# Altium footprint library Footprint-Lib-PhilsLab.PcbLib: 544 footprints (part 24 of 34)
Each footprint in its own frame and in the unit in brackets; x right, y up, seen from the top. Pads: shape width x height; smd on the part's side, far side on the other; paste and mask are expansions set on the pad; w line width, h text height; cw(c..) or ccw(c..) is an arc to the next point about the centre after c.
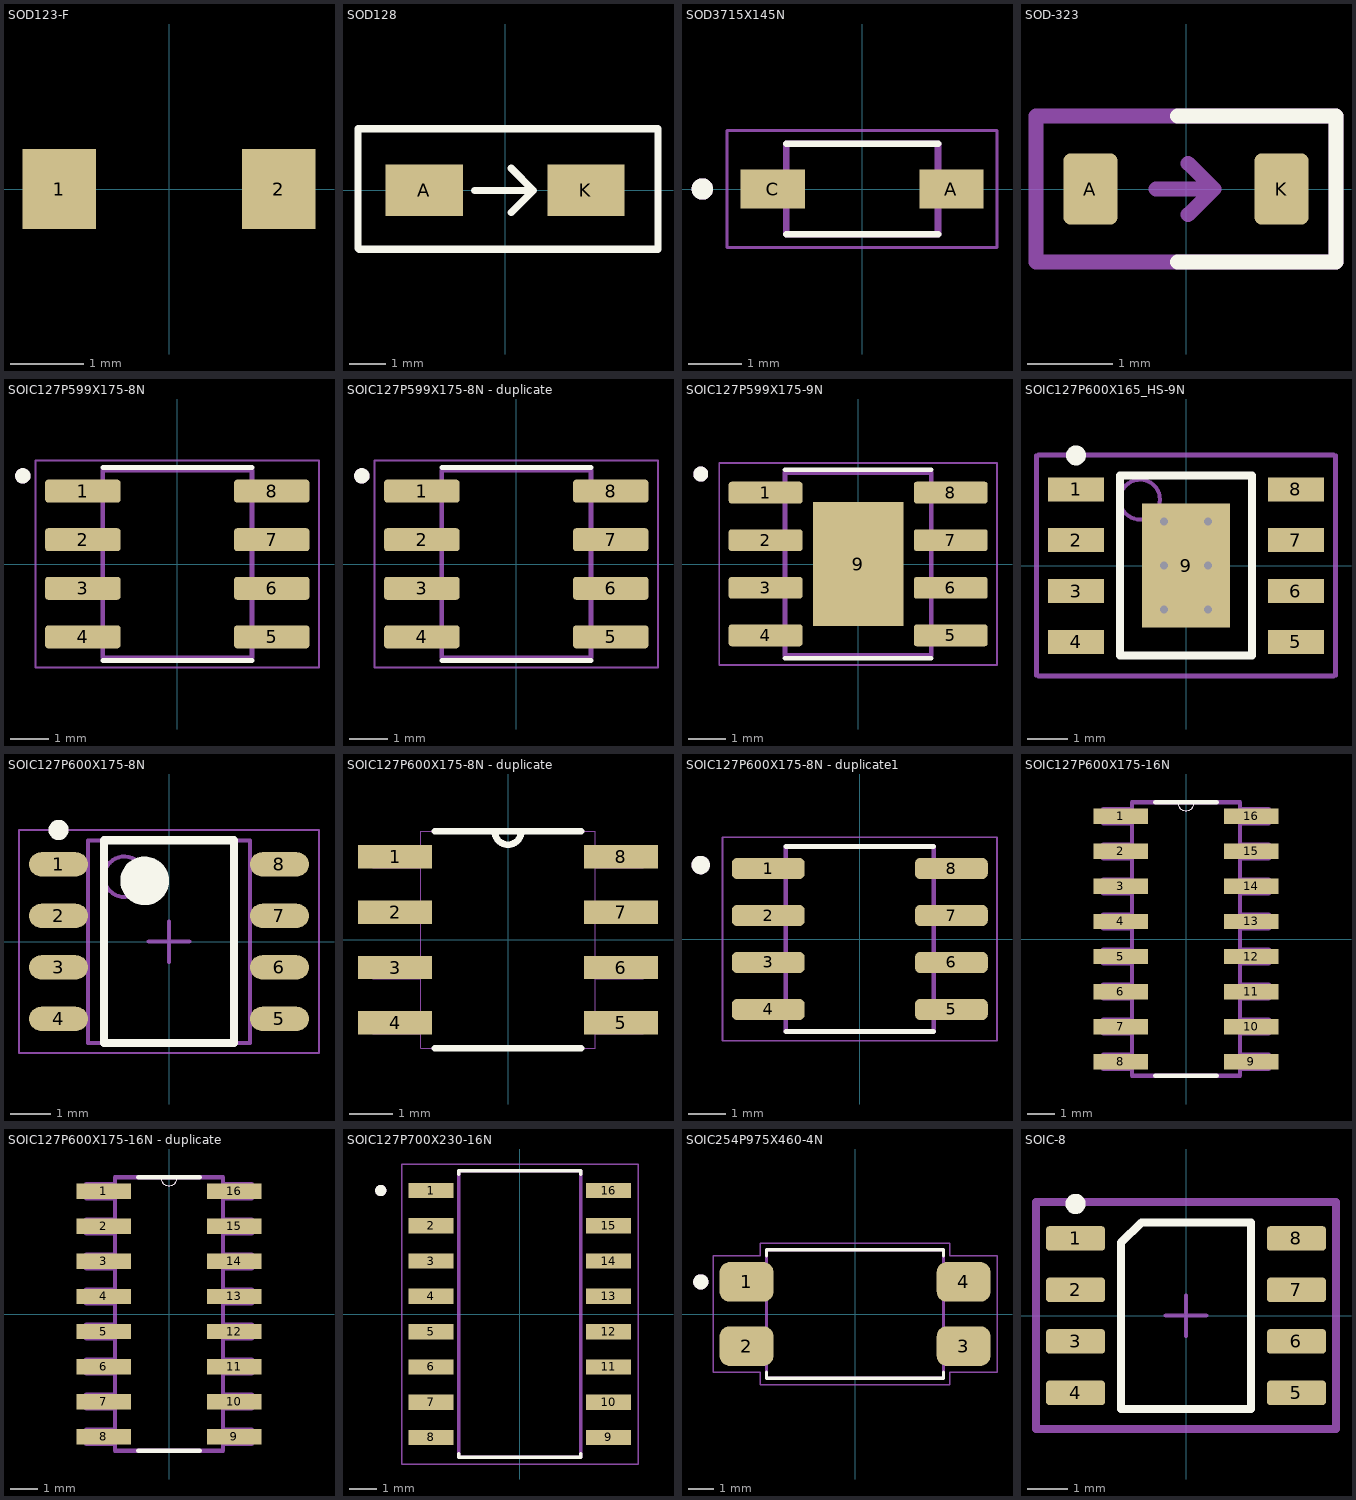
[diagram p23: the footprints below, top view; thin cyan lines are the x and y axes]

## SOD123-F [mm]
pads (2):
  rect 1x1.1 smd: 1(-1.5,0) 2(1.5,0)
3D body "SOD-123F.step": height 1.02, standoff 0, extent -1.9,-0.98 1.9,0.82

## SOD128 [mm]
pads (2):
  rect 2.1x1.4 smd: A(-2.2,0) K(2.2,0)
Top Overlay:
  lines w0.2: -4,1.63 -4,-0.04 -4,-1.58 -3.97,-1.61 4.16,-1.61 4.16,1.67 -3.99,1.67 ; -0.83,-0.01 0.77,-0.01 ; 0.17,-0.61 0.77,-0.01 ; 0.17,0.59 0.77,-0.01
3D body "DO-214AC_SMA.step": height 2.42, standoff 0.01, extent -2.78,-1.2 2.42,1.4

## SOD3715X145N [mm]
pads (2):
  rect 1.21x0.73 smd: A(1.68,0) C(-1.68,0)
Top Overlay:
  circle w0.2: c-3,0 r0.1
  lines w0.127: -1.425,-0.85 1.425,-0.85 ; -1.425,0.85 1.425,0.85
Mechanical 13:
  circle w0.2: c-3,0 r0.1
  lines w0.127: -1.425,-0.85 -1.425,0.85 1.425,0.85 1.425,-0.85 -1.425,-0.85
Mechanical 15:
  lines w0.05: -2.535,-1.1 -2.535,1.1 2.535,1.1 2.535,-1.1 -2.535,-1.1
3D body "step_temp.STEP": height 1.5, standoff -0.03, extent -1.825,-0.775 1.825,0.775

## SOD-323 [mm]
pads (2):
  rrect25% 0.63x0.83 smd: A(-1.115,0) K(1.115,0)
Top Overlay:
  lines w0.175: -0.1,-0.85 1.75,-0.85 1.75,0.85 -0.1,0.85
Mechanical 13:
  lines w0.175: -0.35,0 0.325,0 ; 0.025,-0.3 0.325,0 ; 0.025,0.3 0.325,0 ; -1.75,-0.85 -1.75,0.85 1.75,0.85 1.75,-0.85 -1.75,-0.85
  text "'.Designator'" at -5.677,-0.417 h1
3D body "SOD-323.step": height 1.1, standoff 0, extent -1.3,-0.675 1.3,0.675

## SOIC127P599X175-8N [mm]
pads (8):
  rrect25% 1.97x0.6 smd: 1(-2.47,1.905) 2(-2.47,0.635) 3(-2.47,-0.635) 4(-2.47,-1.905) 5(2.47,-1.905) 6(2.47,-0.635) 7(2.47,0.635) 8(2.47,1.905)
Top Overlay:
  circle w0.2: c-4.04,2.305 r0.1
  lines w0.127: -1.95,-2.525 1.95,-2.525 ; -1.95,2.525 1.95,2.525
Mechanical 13:
  circle w0.2: c-4.04,2.305 r0.1
  lines w0.127: -1.95,-2.452 1.95,-2.452 1.95,2.452 -1.95,2.452 -1.95,-2.452
Mechanical 15:
  lines w0.05: -3.705,-2.702 3.705,-2.702 3.705,2.702 -3.705,2.702 -3.705,-2.702
3D body "step_temp.STEP": height 1.75, standoff 0, extent -2.997,-2.451 2.997,2.451

## SOIC127P599X175-8N - duplicate [mm]
height 1.75
pads (8):
  rrect25% 1.97x0.6 smd paste+0 mask+0.102: 1(-2.47,1.905) 2(-2.47,0.635) 3(-2.47,-0.635) 4(-2.47,-1.905) 5(2.47,-1.905) 6(2.47,-0.635) 7(2.47,0.635) 8(2.47,1.905)
Top Overlay:
  circle w0.2: c-4.04,2.305 r0.1
  lines w0.127: -1.95,-2.525 1.95,-2.525 ; -1.95,2.525 1.95,2.525
Mechanical 13:
  circle w0.2: c-4.04,2.305 r0.1
  lines w0.127: -1.95,-2.452 -1.95,2.452 1.95,2.452 1.95,-2.452 -1.95,-2.452
Mechanical 15:
  lines w0.05: -3.705,-2.702 -3.705,2.702 3.705,2.702 3.705,-2.702 -3.705,-2.702
3D body "step_temp.STEP": height 1.75, standoff 0, extent -2.995,-2.452 2.995,2.452

## SOIC127P599X175-9N [mm]
pads (9):
  rrect25% 1.97x0.58 smd: 1(-2.47,1.905) 2(-2.47,0.635) 3(-2.47,-0.635) 4(-2.47,-1.905) 5(2.47,-1.905) 6(2.47,-0.635) 7(2.47,0.635) 8(2.47,1.905)
  rect 2.413x3.302 smd paste-3: 9(0,0)
Top Overlay:
  circle w0.2: c-4.2,2.4 r0.1
  lines w0.127: -1.949,-2.515 1.949,-2.515 ; -1.949,2.515 1.949,2.515
Top Paste:
  region: 0.76,-1.04 -0.76,-1.04 -0.76,1.04 0.76,1.04
Mechanical 13:
  circle w0.2: c-4.2,2.4 r0.1
  lines w0.127: -1.949,-2.445 -1.949,2.445 1.949,2.445 1.949,-2.445 -1.949,-2.445
Mechanical 15:
  lines w0.05: -3.705,-2.695 -3.705,2.695 3.705,2.695 3.705,-2.695 -3.705,-2.695
3D body "step_temp.STEP": height 1.75, standoff 0, extent -2.998,-2.451 2.998,2.451

## SOIC127P600X165_HS-9N [mm] "SOIC, 8-Leads, Body 4.90x3.90mm, Pitch 1.27mm, Thermal Pad 3.10x2.21mm, IPC Medium Density"
height 1.65
pads (9):
  rect 1.4x0.6 smd: 1(-2.75,1.905) 2(-2.75,0.635) 3(-2.75,-0.635) 4(-2.75,-1.905) 5(2.75,-1.905) 6(2.75,-0.635) 7(2.75,0.635) 8(2.75,1.905)
  rect 2.21x3.1 smd: 9(0,0)
via -0.55,1.1 diameter 0.5 hole 0.2
via 0.55,1.1 diameter 0.5 hole 0.2
via -0.55,0 diameter 0.5 hole 0.2
via 0.55,0 diameter 0.5 hole 0.2
via -0.55,-1.1 diameter 0.5 hole 0.2
via 0.55,-1.1 diameter 0.5 hole 0.2
Top Overlay:
  circle w0.25: c-2.75,2.755 r0.125
  lines w0.2: -1.65,-2.25 -1.65,2.25 1.65,2.25 1.65,-2.25 -1.65,-2.25
Mechanical 13:
  circle w0.1: c-1.15,1.65 r0.5
  lines w0.1: -3.75,-2.75 -3.75,2.75 3.75,2.75 3.75,-2.75 -3.75,-2.75
Mechanical 15:
  lines w0.05: -3.7,-2.8 -3.7,2.8 3.7,2.8 3.7,-2.8 -3.7,-2.8
  lines w0.1: -0.5,0 0.5,0 ; 0,-0.5 0,0.5
3D body "SOIC127P600X165_HS-9N.step": height 1.65, standoff 0, extent -3,-2.55 3,2.55

## SOIC127P600X175-8N [mm] "SOIC, 8-Leads, Body 4.91x3.90mm, Pitch 1.27mm, IPC Medium Density"
height 1.75
pads (8):
  oval 1.45x0.6 smd: 1(-2.725,1.905) 2(-2.725,0.635) 3(-2.725,-0.635) 4(-2.725,-1.905) 5(2.725,-1.905) 6(2.725,-0.635) 7(2.725,0.635) 8(2.725,1.905)
Top Overlay:
  circle w0.6: c-0.6,1.5 r0.3
  circle w0.25: c-2.725,2.755 r0.125
  lines w0.2: -1.6,-2.5 1.6,-2.5 1.6,2.5 -1.6,2.5 -1.6,-2.5
Mechanical 13:
  circle w0.1: c-1.1,1.6 r0.5
  lines w0.1: -2,-2.5 2,-2.5 2,2.5 -2,2.5 -2,-2.5
Mechanical 15:
  lines w0.05: -3.7,-2.75 3.7,-2.75 3.7,2.75 -3.7,2.75 -3.7,-2.75
  lines w0.1: -0.5,0 0.5,0 ; 0,-0.5 0,0.5
3D body "SOIC127P600X175-8N.step": height 1.75, standoff 0, extent -2.997,-2.5 2.997,2.5

## SOIC127P600X175-8N - duplicate [mil]
pads (8):
  rect 67x21 smd paste+0 mask+4.02: 1(-102,75) 2(-102,25) 3(-102,-25) 4(-102,-75) 5(102,-75) 6(102,-25) 7(102,25) 8(102,75)
Top Overlay:
  lines w6: -66,-98 66,-98 ; -66,98 -12,98 ; 66,98 12,98 ; -12,98 ccw(c0,98) 12,98 ; -12,98 12,98
Mechanical 13:
  lines w0: -12,98 ccw(c0,98) 12,98 ; -12,98 -79,98 -79,-98 79,-98 79,98 12,98 ; -12,98 12,98 ; -122,-85 -79,-85 -79,-65 -122,-65 -122,-85 ; -122,-35 -79,-35 -79,-15 -122,-15 -122,-35 ; -122,15 -79,15 -79,35 -122,35 -122,15 ; -122,65 -79,65 -79,85 -122,85 -122,65 ; 79,-85 122,-85 122,-65 79,-65 79,-85 ; 79,-35 122,-35 122,-15 79,-15 79,-35 ; 79,15 122,15 122,35 79,35 79,15 ; 79,65 122,65 122,85 79,85 79,65
3D body "step_temp.STEP": height 68.9, standoff 0, extent -118.11,-98.43 118.11,98.43

## SOIC127P600X175-8N - duplicate1 [mm]
pads (8):
  rrect50% 1.97x0.57 smd paste+0 mask+0.102: 1(-2.475,1.905) 2(-2.475,0.635) 3(-2.475,-0.635) 4(-2.475,-1.905) 5(2.475,-1.905) 6(2.475,-0.635) 7(2.475,0.635) 8(2.475,1.905)
Top Overlay:
  circle w0.3: c-4.3,2 r0.1
  lines w0.127: -2,-2.5 2,-2.5 ; -2,2.5 2,2.5
Mechanical 13:
  circle w0.3: c-4.3,2 r0.1
  lines w0.127: -2,-2.5 -2,2.5 2,2.5 2,-2.5 -2,-2.5
Mechanical 15:
  lines w0.05: -3.71,-2.75 -3.71,2.75 3.71,2.75 3.71,-2.75 -3.71,-2.75
3D body "step_temp.STEP": height 1.75, standoff 0, extent -3,-2.45 3,2.45

## SOIC127P600X175-16N [mil]
pads (16):
  rect 78x22 smd: 1(-93,175) 2(-93,125) 3(-93,75) 4(-93,25) 5(-93,-25) 6(-93,-75) 7(-93,-125) 8(-93,-175) 9(93,-175) 10(93,-125) 11(93,-75) 12(93,-25) 13(93,25) 14(93,75) 15(93,125) 16(93,175)
Top Overlay:
  lines w0: -12,195 ccw(c0,195) 12,195
  lines w6: -44,-195 44,-195 ; -44,195 -12,195 12,195 44,195
Mechanical 13:
  lines w0: -12,195 ccw(c0,195) 12,195
  lines w6: -118,-185 -77,-185 -77,-165 -118,-165 -118,-185 ; -118,-135 -77,-135 -77,-115 -118,-115 -118,-135 ; -118,-85 -77,-85 -77,-65 -118,-65 -118,-85 ; -118,-35 -77,-35 -77,-15 -118,-15 -118,-35 ; -118,15 -77,15 -77,35 -118,35 -118,15 ; -118,65 -77,65 -77,85 -118,85 -118,65 ; -118,115 -77,115 -77,135 -118,135 -118,115 ; -118,165 -77,165 -77,185 -118,185 -118,165 ; -77,-195 -77,195 -12,195 12,195 77,195 77,-195 -77,-195 ; 77,-185 118,-185 118,-165 77,-165 77,-185 ; 77,-135 118,-135 118,-115 77,-115 77,-135 ; 77,-85 118,-85 118,-65 77,-65 77,-85 ; 77,-35 118,-35 118,-15 77,-15 77,-35 ; 77,15 118,15 118,35 77,35 77,15 ; 77,65 118,65 118,85 77,85 77,65 ; 77,115 118,115 118,135 77,135 77,115 ; 77,165 118,165 118,185 77,185 77,165
3D body "MCP3008T-I_SL.STEP": height 68.9, standoff 0, extent -118.11,-194.88 118.11,194.88

## SOIC127P600X175-16N - duplicate [mil]
pads (16):
  rect 78x22 smd: 1(-93,175) 2(-93,125) 3(-93,75) 4(-93,25) 5(-93,-25) 6(-93,-75) 7(-93,-125) 8(-93,-175) 9(93,-175) 10(93,-125) 11(93,-75) 12(93,-25) 13(93,25) 14(93,75) 15(93,125) 16(93,175)
Top Overlay:
  lines w0: -12,195 ccw(c0,195) 12,195
  lines w6: -44,-195 44,-195 ; -44,195 -12,195 12,195 44,195
Mechanical 13:
  lines w0: -12,195 ccw(c0,195) 12,195
  lines w6: -118,-185 -77,-185 -77,-165 -118,-165 -118,-185 ; -118,-135 -77,-135 -77,-115 -118,-115 -118,-135 ; -118,-85 -77,-85 -77,-65 -118,-65 -118,-85 ; -118,-35 -77,-35 -77,-15 -118,-15 -118,-35 ; -118,15 -77,15 -77,35 -118,35 -118,15 ; -118,65 -77,65 -77,85 -118,85 -118,65 ; -118,115 -77,115 -77,135 -118,135 -118,115 ; -118,165 -77,165 -77,185 -118,185 -118,165 ; -77,-195 -77,195 -12,195 12,195 77,195 77,-195 -77,-195 ; 77,-185 118,-185 118,-165 77,-165 77,-185 ; 77,-135 118,-135 118,-115 77,-115 77,-135 ; 77,-85 118,-85 118,-65 77,-65 77,-85 ; 77,-35 118,-35 118,-15 77,-15 77,-35 ; 77,15 118,15 118,35 77,35 77,15 ; 77,65 118,65 118,85 77,85 77,65 ; 77,115 118,115 118,135 77,135 77,115 ; 77,165 118,165 118,185 77,185 77,165

## SOIC127P700X230-16N [mm]
pads (16):
  rect 1.62x0.55 smd: 1(-3.195,4.445) 2(-3.195,3.175) 3(-3.195,1.905) 4(-3.195,0.635) 5(-3.195,-0.635) 6(-3.195,-1.905) 7(-3.195,-3.175) 8(-3.195,-4.445) 9(3.195,-4.445) 10(3.195,-3.175) 11(3.195,-1.905) 12(3.195,-0.635) 13(3.195,0.635) 14(3.195,1.905) 15(3.195,3.175) 16(3.195,4.445)
Top Overlay:
  circle w0.2: c-5.005,4.445 r0.1
  lines w0.127: -2.2,-5.04 -2.2,-5.15 2.2,-5.15 2.2,-5.04 ; -2.2,5.04 -2.2,5.15 2.2,5.15 2.2,5.04
Mechanical 13:
  circle w0.2: c-5.005,4.445 r0.1
  lines w0.127: -2.2,-5.15 -2.2,5.15 2.2,5.15 2.2,-5.15 -2.2,-5.15
Mechanical 15:
  lines w0.05: -4.255,-5.4 4.255,-5.4 4.255,5.4 -4.255,5.4 -4.255,-5.4

## SOIC254P975X460-4N [mm]
pads (4):
  rrect50% 2.13x1.57 smd: 1(-4.29,1.27) 2(-4.29,-1.27) 3(4.29,-1.27) 4(4.29,1.27)
Top Overlay:
  circle w0.3: c-6.1,1.27 r0.15
  lines w0.127: -3.5,-2.304 -3.5,-2.54 3.5,-2.54 3.5,-2.304 ; -3.5,2.304 -3.5,2.54 3.5,2.54 3.5,2.304
Mechanical 13:
  circle w0.3: c-6.1,1.27 r0.15
  lines w0.127: -3.5,-2.54 -3.5,2.54 3.5,2.54 3.5,-2.54 -3.5,-2.54
Mechanical 15:
  lines w0.05: -5.61,-2.31 -5.61,2.31 -3.75,2.31 -3.75,2.79 3.75,2.79 3.75,2.31 5.61,2.31 5.61,-2.31 3.75,-2.31 3.75,-2.79 -3.75,-2.79 -3.75,-2.31 -5.61,-2.31
3D body "step_temp.STEP": height 4, standoff 0, extent -4.875,-2.29 4.875,2.29

## SOIC-8 [mm] "SOIC, 8-Leads, Body 4.91x3.90mm, Pitch 1.27mm, IPC Medium Density"
height 1.75
pads (8):
  rrect25% 1.45x0.6 smd: 1(-2.725,1.905) 2(-2.725,0.635) 3(-2.725,-0.635) 4(-2.725,-1.905) 5(2.725,-1.905) 6(2.725,-0.635) 7(2.725,0.635) 8(2.725,1.905)
Top Overlay:
  circle w0.25: c-2.725,2.755 r0.125
  lines w0.2: -1.6,-2.3 -1.6,1.8 -1.1,2.3 1.6,2.3 1.6,-2.3 -1.6,-2.3
Mechanical 13:
  circle w0.3: c-2.7,1.9 r0.12
  lines w0.2: -3.7,-2.8 -3.7,2.8 3.7,2.8 3.7,-2.8 -3.7,-2.8
  text "'.Designator'" at -6.315,-1.4 h1
Mechanical 15:
  lines w0.05: -3.7,-2.75 3.7,-2.75 3.7,2.75 -3.7,2.75 -3.7,-2.75
  lines w0.1: -0.5,0 0.5,0 ; 0,-0.5 0,0.5
3D body "SOIC-8.step": height 1.75, standoff 0, extent -2.997,-2.5 2.997,2.5